# Altium footprint library 排母.PcbLib: 66 footprints (part 1 of 5)
Each footprint in its own frame and in the unit in brackets; x right, y up, seen from the top. Pads: shape width x height; smd on the part's side, far side on the other; paste and mask are expansions set on the pad; w line width, h text height; cw(c..) or ccw(c..) is an arc to the next point about the centre after c.
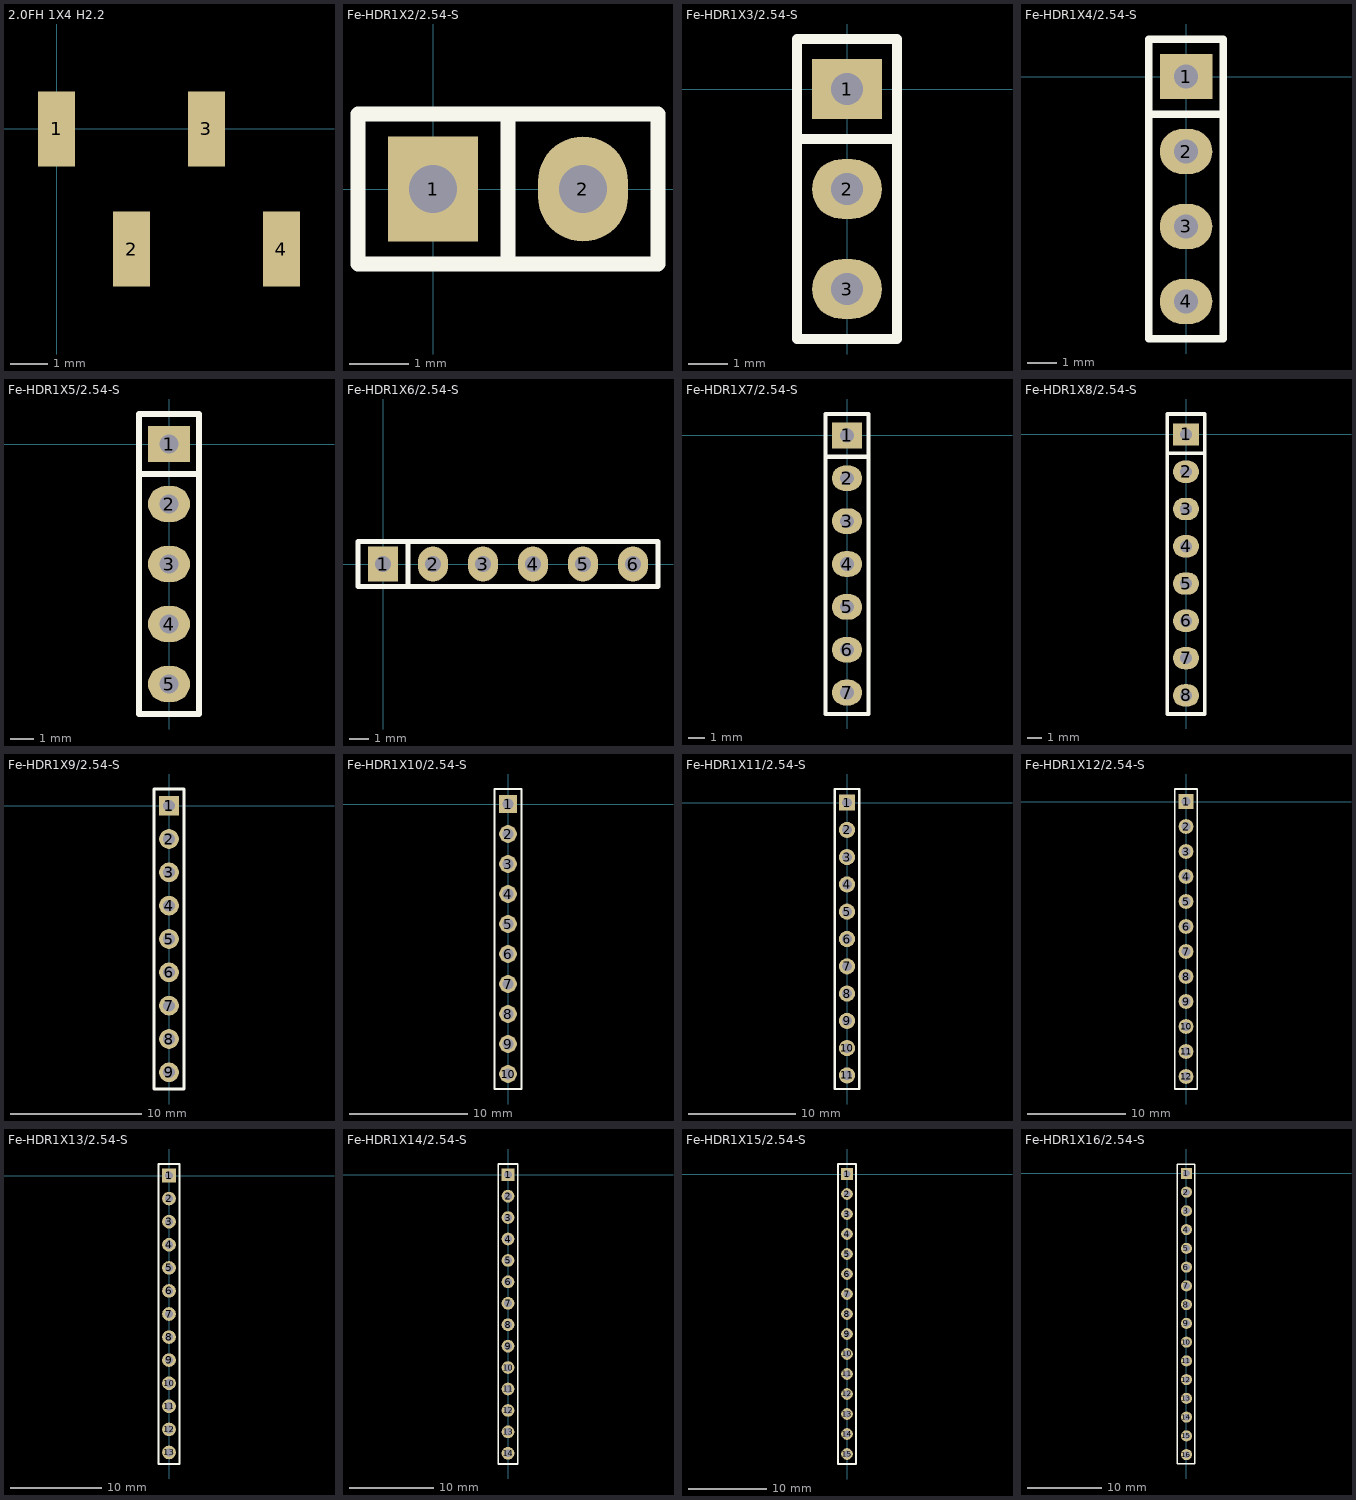
[diagram p0: the footprints below, top view; thin cyan lines are the x and y axes]

## 2.0FH 1X4 H2.2 [mm] "贴片单排排母"
height 2.2
pads (4):
  rect 0.98x2 smd: 1(0,0) 2(2,-3.2) 3(4,0) 4(6,-3.2)

## Fe-HDR1X2/2.54-S [mil] "Connector; Header; 2x2 Position"
pads (2):
  rect 60x70 hole 32: 1(0,0)
  oval 60x70 hole 32: 2(100,0)
Top Overlay:
  lines w10: 50,-50 50,50 ; -50,-50 -50,50 150,50 150,-50 -50,-50
3D body "Female-Header-2.54-Single-2.stp": height 334.65, standoff -125.98, extent -54.92,-48.43 154.92,50

## Fe-HDR1X3/2.54-S [mil]
pads (3):
  rect 70x60 hole 32: 1(0,0)
  oval 70x60 hole 32: 2(0,-100) 3(0,-200)
Top Overlay:
  lines w10: -50,-50 50,-50 ; -50,-250 50,-250 50,50 -50,50 -50,-250
3D body "Female-Header-2.54-Single-3.stp": height 334.65, standoff -125.98, extent -50,-254.92 48.43,54.92

## Fe-HDR1X4/2.54-S [mil]
pads (4):
  rect 70x60 hole 32: 1(0,0)
  oval 70x60 hole 32: 2(0,-100) 3(0,-200) 4(0,-300)
Top Overlay:
  lines w10: -50,-50 50,-50 ; -50,-350 -50,50 50,50 50,-350 -50,-350
3D body "Female-Header-2.54-Single-4.stp": height 334.65, standoff -125.98, extent -44.21,-354.92 54.22,54.92

## Fe-HDR1X5/2.54-S [mil]
pads (5):
  rect 70x60 hole 32: 1(0,0)
  oval 70x60 hole 32: 2(0,-100) 3(0,-200) 4(0,-300) 5(0,-400)
Top Overlay:
  lines w10: -50,-50 50,-50 ; -50,-450 50,-450 50,50 -50,50 -50,-450
3D body "Female-Header-2.54-Single-5.stp": height 125.98, standoff -334.65, extent -50,-454.92 48.43,54.92

## Fe-HDR1X6/2.54-S [mil]
pads (6):
  rect 60x70 hole 32: 1(0,0)
  oval 60x70 hole 32: 2(100,0) 3(200,0) 4(300,0) 5(400,0) 6(500,0)
Top Overlay:
  lines w10: 50,-45 50,45 ; -50,-45 550,-45 550,45 -50,45 -50,-45
3D body "Female-Header-2.54-Single-6.stp": height 108.98, standoff -351.65, extent -54.84,-49.21 555,49.21

## Fe-HDR1X7/2.54-S [mil]
pads (7):
  rect 70x60 hole 32: 1(0,0)
  oval 70x60 hole 32: 2(0,-100) 3(0,-200) 4(0,-300) 5(0,-400) 6(0,-500) 7(0,-600)
Top Overlay:
  lines w10: -50,-50 50,-50 ; -50,-650 -50,50 50,50 50,-650 -50,-650
3D body "Female-Header-2.54-Single-7.stp": height 125.98, standoff -334.65, extent -49.21,-654.92 49.22,54.92

## Fe-HDR1X8/2.54-S [mil]
pads (8):
  rect 70x60 hole 32: 1(0,0)
  oval 70x60 hole 32: 2(0,-100) 3(0,-200) 4(0,-300) 5(0,-400) 6(0,-500) 7(0,-600) 8(0,-700)
Top Overlay:
  lines w10: -50,-50 50,-50 ; -50,-750 -50,55 50,55 50,-750 -50,-750
3D body "Female-Header-2.54-Single-8.stp": height 125.98, standoff -334.65, extent -49.21,-754.92 49.22,54.92

## Fe-HDR1X9/2.54-S [mm]
pads (9):
  rect 1.5x1.5 hole 0.9: 1(0,0)
  round 1.5 hole 0.9: 2(0,-2.54) 3(0,-5.08) 4(0,-7.62) 5(0,-10.16) 6(0,-12.7) 7(0,-15.24) 8(0,-17.78) 9(0,-20.32)
Top Overlay:
  lines w0.2: -1.143,-21.59 -1.143,1.27 1.143,1.27 1.143,-21.59 -1.143,-21.59
3D body "Female-Header-2.54-Single-9.stp": height 3.2, standoff -8.5, extent -1.25,-21.715 1.25,1.395

## Fe-HDR1X10/2.54-S [mm]
pads (10):
  rect 1.5x1.5 hole 0.9: 1(0,0)
  round 1.5 hole 0.9: 2(0,-2.54) 3(0,-5.08) 4(0,-7.62) 5(0,-10.16) 6(0,-12.7) 7(0,-15.24) 8(0,-17.78) 9(0,-20.32) 10(0,-22.86)
Top Overlay:
  lines w0.2: -1.143,-24.13 1.143,-24.13 1.143,-0.762 1.143,1.27 -1.143,1.27 -1.143,-24.13
3D body "Female-Header-2.54-Single-10.stp": height 3.2, standoff -8.5, extent -1.25,-24.255 1.25,1.395

## Fe-HDR1X11/2.54-S [mm]
pads (11):
  rect 1.5x1.5 hole 0.9: 1(0,0)
  round 1.5 hole 0.9: 2(0,-2.54) 3(0,-5.08) 4(0,-7.62) 5(0,-10.16) 6(0,-12.7) 7(0,-15.24) 8(0,-17.78) 9(0,-20.32) 10(0,-22.86) 11(0,-25.4)
Top Overlay:
  lines w0.2: -1.143,-26.67 1.143,-26.67 1.143,-0.508 1.143,1.27 -1.143,1.27 -1.143,-26.67
3D body "Female-Header-2.54-Single-11.stp": height 3.2, standoff -8.5, extent -1.25,-26.795 1.25,1.395

## Fe-HDR1X12/2.54-S [mm]
pads (12):
  rect 1.5x1.5 hole 0.9: 1(0,0)
  round 1.5 hole 0.9: 2(0,-2.54) 3(0,-5.08) 4(0,-7.62) 5(0,-10.16) 6(0,-12.7) 7(0,-15.24) 8(0,-17.78) 9(0,-20.32) 10(0,-22.86) 11(0,-25.4) 12(0,-27.94)
Top Overlay:
  lines w0.2: -1.143,-29.21 1.143,-29.21 1.143,-0.508 1.143,1.27 -1.143,1.27 -1.143,-29.21
3D body "Female-Header-2.54-Single-12.stp": height 3.2, standoff -8.5, extent -1.27,-29.337 1.23,1.393

## Fe-HDR1X13/2.54-S [mm]
pads (13):
  rect 1.5x1.5 hole 0.9: 1(0,0)
  round 1.5 hole 0.9: 2(0,-2.54) 3(0,-5.08) 4(0,-7.62) 5(0,-10.16) 6(0,-12.7) 7(0,-15.24) 8(0,-17.78) 9(0,-20.32) 10(0,-22.86) 11(0,-25.4) 12(0,-27.94) 13(0,-30.48)
Top Overlay:
  lines w0.2: -1.143,-31.75 1.143,-31.75 1.143,-0.508 1.143,1.27 -1.143,1.27 -1.143,-31.75
3D body "Female-Header-2.54-Single-13.stp": height 3.2, standoff -8.5, extent -1.25,-31.875 1.25,1.395

## Fe-HDR1X14/2.54-S [mm]
pads (14):
  rect 1.5x1.5 hole 0.9: 1(0,0)
  round 1.5 hole 0.9: 2(0,-2.54) 3(0,-5.08) 4(0,-7.62) 5(0,-10.16) 6(0,-12.7) 7(0,-15.24) 8(0,-17.78) 9(0,-20.32) 10(0,-22.86) 11(0,-25.4) 12(0,-27.94) 13(0,-30.48) 14(0,-33.02)
Top Overlay:
  lines w0.2: -1.143,-34.29 1.143,-34.29 1.143,-0.508 1.143,1.27 -1.143,1.27 -1.143,-34.29
3D body "Female-Header-2.54-Single-14.stp": height 3.2, standoff -8.5, extent -1.23,-34.413 1.27,1.397

## Fe-HDR1X15/2.54-S [mm]
pads (15):
  rect 1.5x1.5 hole 0.9: 1(0,0)
  round 1.5 hole 0.9: 2(0,-2.54) 3(0,-5.08) 4(0,-7.62) 5(0,-10.16) 6(0,-12.7) 7(0,-15.24) 8(0,-17.78) 9(0,-20.32) 10(0,-22.86) 11(0,-25.4) 12(0,-27.94) 13(0,-30.48) 14(0,-33.02) 15(0,-35.56)
Top Overlay:
  lines w0.2: -1.143,-36.83 -1.143,1.27 1.143,1.27 1.143,-0.508 1.143,-36.83 -1.143,-36.83
3D body "Female-Header-2.54-Single-15.stp": height 3.2, standoff -8.5, extent -1.23,-36.953 1.27,1.397

## Fe-HDR1X16/2.54-S [mm]
pads (16):
  rect 1.5x1.5 hole 0.9: 1(0,0)
  round 1.5 hole 0.9: 2(0,-2.54) 3(0,-5.08) 4(0,-7.62) 5(0,-10.16) 6(0,-12.7) 7(0,-15.24) 8(0,-17.78) 9(0,-20.32) 10(0,-22.86) 11(0,-25.4) 12(0,-27.94) 13(0,-30.48) 14(0,-33.02) 15(0,-35.56) 16(0,-38.1)
Top Overlay:
  lines w0.2: -1.27,-39.37 1.143,-39.37 1.143,-0.508 1.143,1.27 -1.27,1.27 -1.27,-39.37
3D body "Female-Header-2.54-Single-16.stp": height 3.2, standoff -8.5, extent -1.25,-39.495 1.25,1.395